# Altium schematic symbol library PTS645SH50SMTR92LFS.SchLib: 1 symbol
Pins are listed as number, name and electrical type; pins without a type are passive.

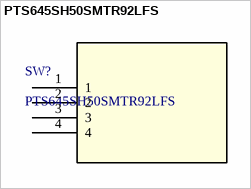
[diagram p0: symbol PTS645SH50SMTR92LFS]

## PTS645SH50SMTR92LFS
designator SW?
Description; Manufacturer_Name: C&K Components; Type: Tactile Switches; Copyright: Copyright (C) 2026 Ultra Librarian. All rights reserved.; Manufacturer_Part_Number: PTS645SH50SMTR92LFS; RefDes: RefDes
footprint PTS645S_SMTR92_CNK
pins: 1, 2, 3, 4